# EAGLE library part TMUX1204DGSR (library TMUX1204DGSR)
5-V 4:1 general-purpose analog multiplexer Source: Datasheet <http://www.ti.com/lit/gpn/TMUX1204>
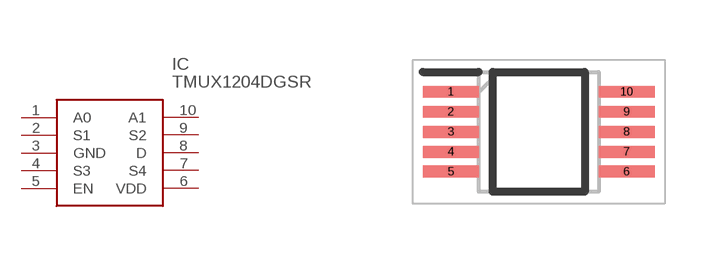
[diagram p0: symbol with the pads of SOP50P490X110-10N; footprint SOP50P490X110-10N]

Designator prefix IC

## TMUX1204DGSR (Description: 5-V 4:1 general-purpose analog multiplexer; Height: 1.1mm; Manufacturer_Name: Texas Instruments; Manufacturer_Part_Number: TMUX1204DGSR; Mouser_Part_Number: 595-TMUX1204DGSR; Mouser_Price-Stock: https://www.mouser.co.uk/ProductDetail/Texas-Instruments/TMUX1204DGSR?qs=EBDBlbfErPw42Q0DdvAwUg%3D%3D)  [SOP50P490X110-10N]
1  A0  in
2  S1
3  GND  pwr
4  S3
5  EN  in
6  VDD  pwr
7  S4
8  D
9  S2
10  A1  in

## Footprint SOP50P490X110-10N (pad centres in mm)
VSSOP
smd 1.4 x 0.3: 1 -2.2,1; 2 -2.2,0.5; 3 -2.2,0; 4 -2.2,-0.5; 5 -2.2,-1; 6 2.2,-1; 7 2.2,-0.5; 8 2.2,0; 9 2.2,0.5; 10 2.2,1